# Altium integrated library Screw Terminal 4-pin 3.81 mm - 1727036.IntLib: 1 symbol
Pins are listed as number, name and electrical type; pins without a type are passive.

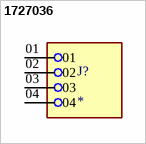
[diagram p0: symbol 1727036]

## 1727036
designator J?
MP: 1727036; Package: None; Price: None; Value: *; Availability: Unavailable
footprint PHOENIX_1727036
pins: 01, 02, 03, 04